# Altium footprint library PCB - CONNECTORS - MOLEX 35318-0820.PCBLIB: 1 footprints
Each footprint in its own frame and in the unit in brackets; x right, y up, seen from the top. Pads: shape width x height; smd on the part's side, far side on the other; paste and mask are expansions set on the pad; w line width, h text height; cw(c..) or ccw(c..) is an arc to the next point about the centre after c.
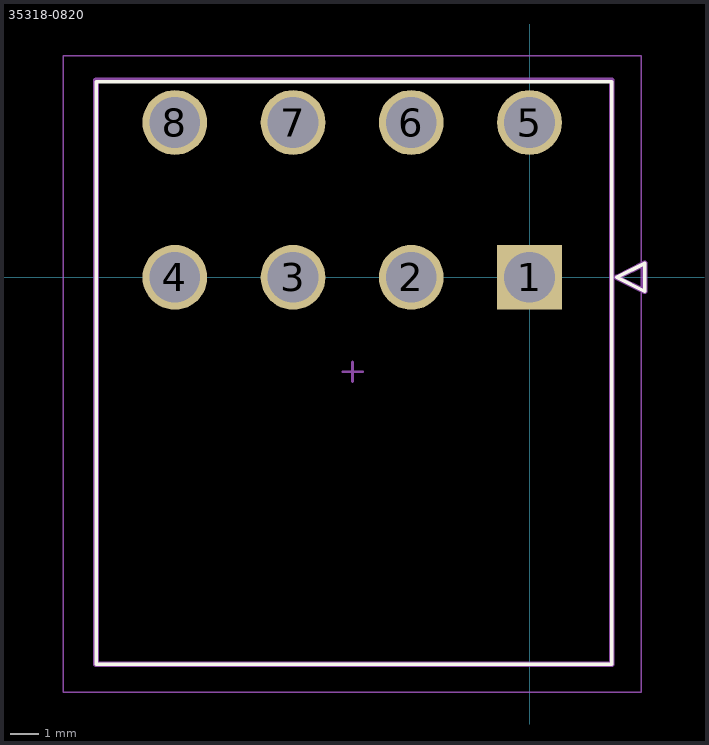
[diagram p0: the footprint, top view; thin cyan lines are the x and y axes]

## 35318-0820 [mm]
pads (8):
  rect 2.3x2.3 hole 1.8: 1(0,0)
  round 2.3 hole 1.8: 2(-4.2,0) 3(-8.4,0) 4(-12.6,0) 5(0,5.5) 6(-4.2,5.5) 7(-8.4,5.5) 8(-12.6,5.5)
Top Overlay:
  lines w0.127: -15.399,-13.75 2.926,-13.75 2.926,6.95 -15.399,6.95 -15.399,-13.75 ; 3.1,0 4.1,-0.5 4.1,0.5 3.1,0
Top Assembly:
  lines w0.2: -15.399,-13.75 2.926,-13.75 2.926,7 -15.399,7 -15.399,-13.75 ; 3.1,0 4.1,-0.5 4.1,0.5 3.1,0
Top Courtyard:
  lines w0.05: -16.57,-14.738 -16.57,7.869 3.97,7.869 3.97,-14.738 -16.57,-14.738
Top Designator:
  text ".Designator" at -9.524,-16.312 h0.7
Top Component Center:
  lines w0.1: -6.637,-3.356 -5.937,-3.356 ; -6.287,-3.706 -6.287,-3.006
3D body "35318-0820.stp": height 11.3, standoff -4.1, extent -15.3,-13.75 3.097,6.185